# Altium schematic symbol library TPS566231RQFR.SchLib: 1 symbol
Pins are listed as number, name and electrical type; pins without a type are passive.

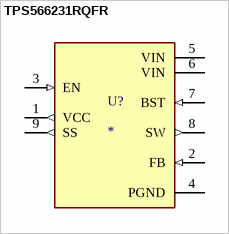
[diagram p0: symbol TPS566231RQFR]

## TPS566231RQFR
designator U?
MF: {'manufacturer': u'Texas Instruments'}; MP: TPS566231RQFR; Package: None; Price: None; Value: *; Availability: Unavailable
footprint IC_TPS566231RQFR
pins: 1 VCC (out), 2 FB (in), 3 EN (in), 4 PGND (power), 5 VIN (power), 6 VIN (power), 7 BST (in), 8 SW (out), 9 SS (out)